# Altium schematic symbol library LD39200PU33R.SchLib: 1 symbol
Pins are listed as number, name and electrical type; pins without a type are passive.

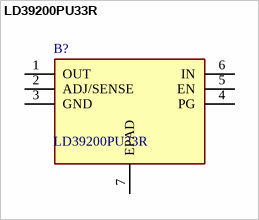
[diagram p0: symbol LD39200PU33R]

## LD39200PU33R
designator B?
LDO Voltage Regulators 2 A high PSRR ultra low drop linear regulator with reverse current protection; Manufacturer_Name: STMicroelectronics; Geometry.Height: 1mm; Mouser Part Number: 511-LD39200PU33R; Mouser Price/Stock: https://www.mouser.co.uk/ProductDetail/STMicroelectronics/LD39200PU33R?qs=WHlX%252B%252B9%2FRwAl6%2FJDqRS1uw%3D%3D; Manufacturer_Part_Number: LD39200PU33R; Datasheet Link: https://www.st.com/resource/en/datasheet/ld39200.pdf
footprint SON95P300X300X100-7N-D
pins: 1 OUT, 2 ADJ/SENSE, 3 GND, 4 PG, 5 EN, 6 IN, 7 EPAD